# EAGLE library part 6200XX11121_62000611121 (library WR-PHD)
WR-PHD 2.00 mm THT Pin Header Article Properties Pins 2 unitless; 3 unitless; 4 unitless; 6 unitless; 8 unitless; 10 unitless; 20 unitless; 32 unitless General Information Operating Temperature -40 °C up to +105 °C Compliance Lead free / RoHS Pitch 2 mm Durability 50 Cycles Rows Single Gender Pin Header Type Straight Material Properties Insulator Material PA9T Insulator Flammability Rating UL94 V-0 Contact Material Copper Alloy Contact Plating Gold Contact Type Stamped Certification UL Approval E323964 Packaging Properties Packaging Bag Electrical Properties IR 2 A Withstanding Voltage 500 V (AC) Contact Resistance 20 mΩ RISO 1000 MΩ <https://www.we-online.com/components/media/o33219v209%20Family_WR-PHD_6200xx11121.jpg> Details see: www.we-online.com/en/components/products/PHD_2_00_THT_PIN_HEADER_6200XX11121 <www.we-online.com/catalog/PHD_2_00_THT_PIN_HEADER_6200XX11121/?utm_source=eagle_model&utm_medium=description_link&utm_campaign=eisos_eagle> Updated by Ella 2024-01-31 2024 (C) Würth Elektronik
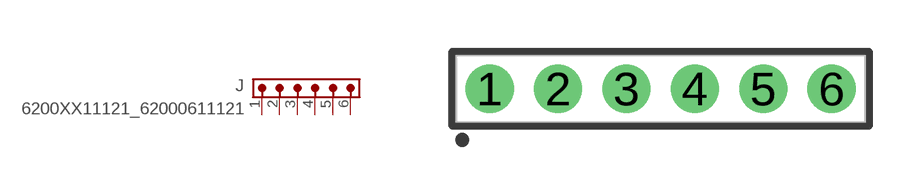
[diagram p276: symbol with the pads of 62000611121; footprint 62000611121]

Designator prefix J

## 6200XX11121_62000611121 (DATASHEET-URL: https://www.we-online.com/redexpert/spec/62000611121?ae; GENDER: Pin Header; IR: 2A; MOUNT: THT; PACKAGING: Bag; PART-NUMBER: 62000611121; PINS: 6; PITCH: 2.00 mm; ROWS: Single; TYPE: Straight; VALUE: 62000611121)  [62000611121]
1  1  pas
2  2  pas
3  3  pas
4  4  pas
5  5  pas
6  6  pas

## Footprint 62000611121 (pad centres in mm)
WR-PHD 2.00 mm THT Pin Header, 6 Pins
drill 0.9: 1 -5,0; 2 -3,0; 3 -1,0; 4 1,0; 5 3,0; 6 5,0